# EAGLE library part AD8221ARMZ (library AD8221ARMZ)
Instrumentation Amplifiers Precision Instrumentation Amplifier Source: Datasheet <https://componentsearchengine.com/Datasheets/2/AD8221ARMZ.pdf>
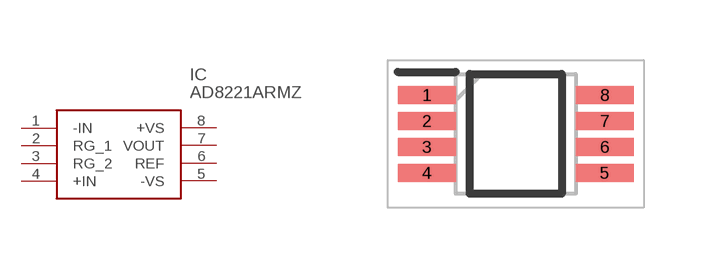
[diagram p0: symbol with the pads of SOP65P490X110-8N; footprint SOP65P490X110-8N]

Designator prefix IC

## AD8221ARMZ (Description: Instrumentation Amplifiers Precision Instrumentation Amplifier; Height: 1.1mm; Manufacturer_Name: Analog Devices; Manufacturer_Part_Number: AD8221ARMZ; Mouser_Part_Number: 584-AD8221ARMZ; Mouser_Price-Stock: https://www.mouser.co.uk/ProductDetail/Analog-Devices/AD8221ARMZ?qs=%2FtpEQrCGXCxTYonUPIPyhA%3D%3D)  [SOP65P490X110-8N]
1  -IN
2  RG_1
3  RG_2
4  +IN
5  -VS
6  REF
7  VOUT
8  +VS

## Footprint SOP65P490X110-8N (pad centres in mm)
AD8221ARMZ
smd 1.45 x 0.45: 1 -2.225,0.975; 2 -2.225,0.325; 3 -2.225,-0.325; 4 -2.225,-0.975; 5 2.225,-0.975; 6 2.225,-0.325; 7 2.225,0.325; 8 2.225,0.975